# Altium footprint library FMU3_REV_D.PcbLib: 37 footprints (part 1 of 3)
Each footprint in its own frame and in the unit in brackets; x right, y up, seen from the top. Pads: shape width x height; smd on the part's side, far side on the other; paste and mask are expansions set on the pad; w line width, h text height; cw(c..) or ccw(c..) is an arc to the next point about the centre after c.
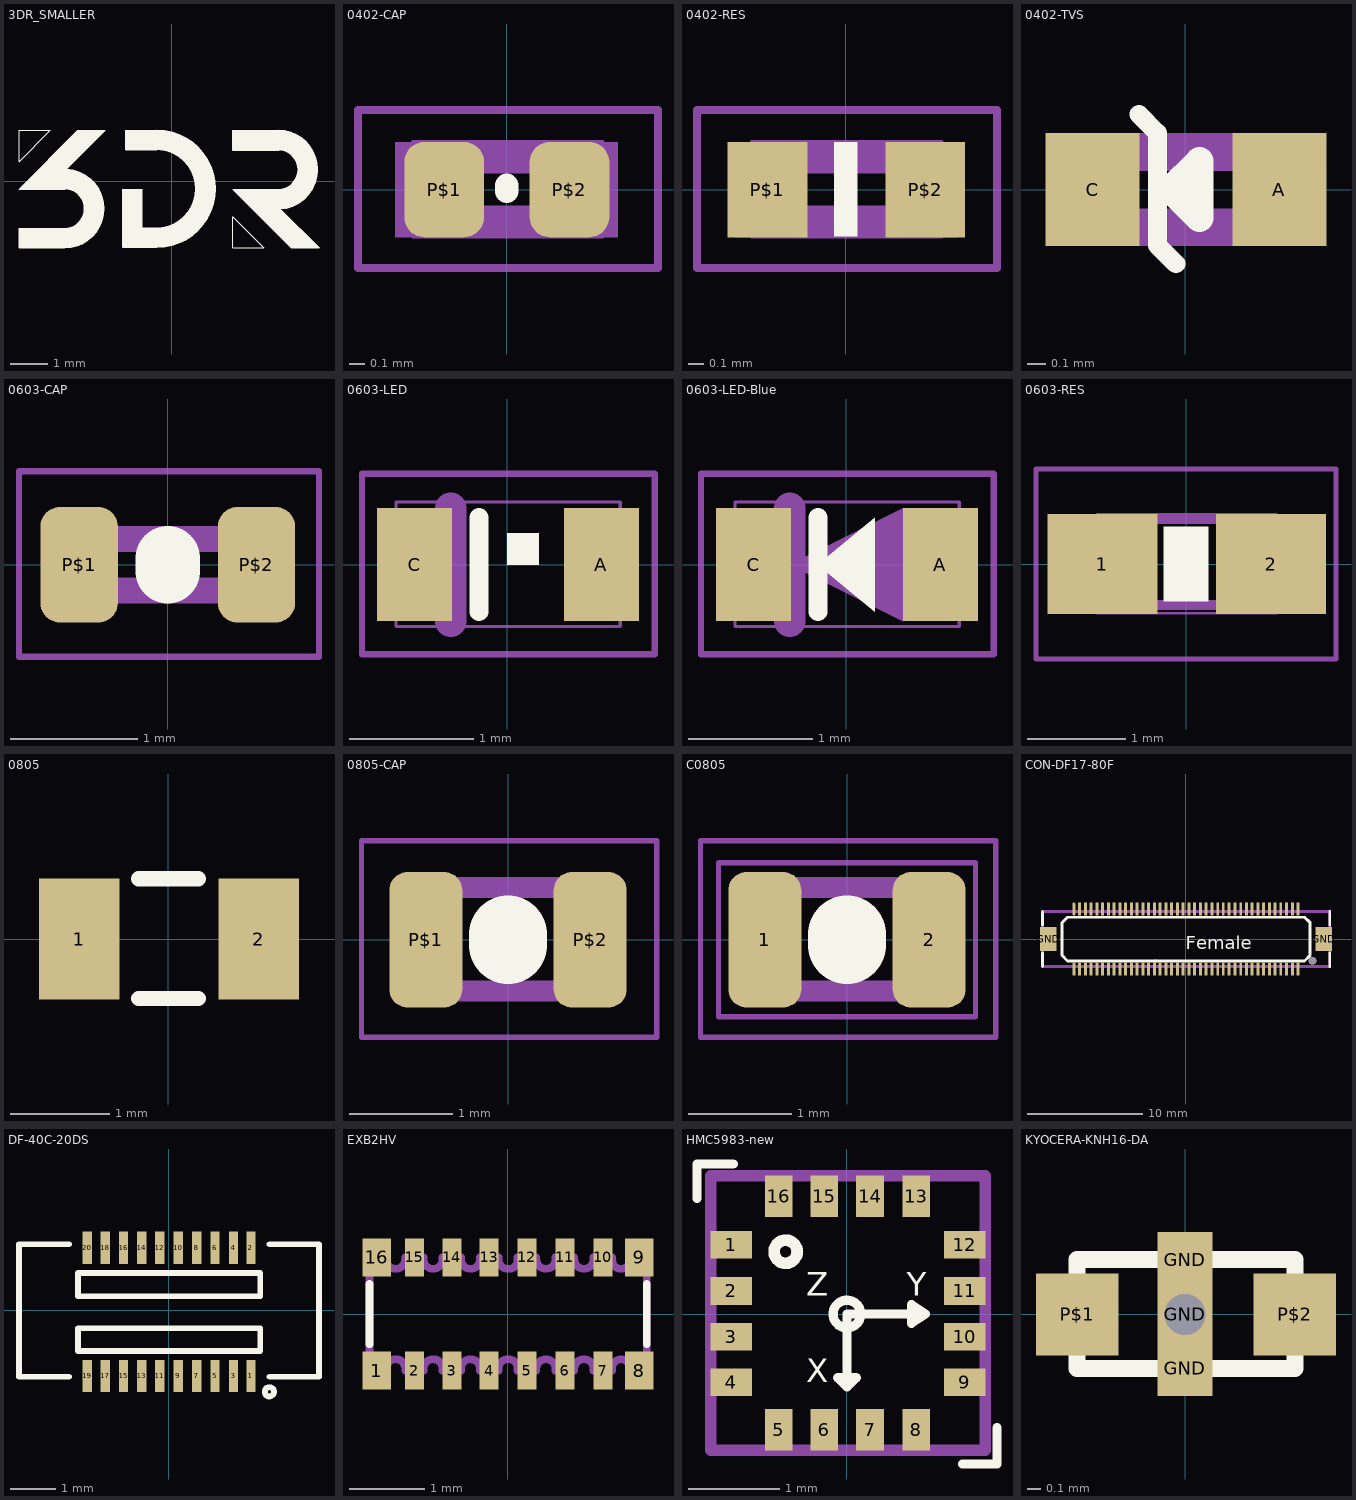
[diagram p0: the footprints below, top view; thin cyan lines are the x and y axes]

## 3DR_SMALLER [mil]
Top Overlay:
  drawing of 45 lines, arcs and shapes, not listed
Top Solder:
  region: 96.53,-69.74 63.94,-69.74 63.94,-37.15
  region: -160.22,20.8 -160.22,53.38 -127.63,53.38

## 0402-CAP [mil]
pads (2):
  rrect50% 20x24 smd mask+0: P$1(-15.75,0) P$2(15.75,0)
Top Overlay:
  lines w6: 0,-0.39 0,1
Mechanical 16:
  rectangle: -28.04,-12 -16.04,12
  rectangle: 15.96,-12 27.96,12
  lines w1: -23.62,-11.81 24,-11.81 24,12 -23.62,12 -23.62,-11.81
  lines w2: -37.4,-19.68 38,-19.68 38,20 -37.4,20 -37.4,-19.68
  lines w8: -20,-8 20,-8 ; -20,8 20,8
3D body: height 19.68, standoff 0, extent -19.69,-9.84 19.69,9.84

## 0402-RES [mil] "0402-RES"
height 66.93
pads (2):
  rect 20x24 smd: P$1(-19.68,0) P$2(20,0)
Top Overlay:
  rectangle: -3,-11.8 3,12.01
Mechanical 16:
  rectangle: -28,-12 -16,12
  rectangle: 16,-12 28,12
  lines w1: -23.62,-11.81 24,-11.81 24,12 -23.62,12 -23.62,-11.81
  lines w2: -37.4,-19.68 38,-19.68 38,20 -37.4,20 -37.4,-19.68
  lines w8: -20,-8 20,-8 ; -20,8 20,8
3D body: height 19.68, standoff 0, extent -19.69,-9.84 19.69,9.84

## 0402-TVS [mil] "0402-TVS"
pads (2):
  rect 20x24 smd: A(20,0) C(-19.68,0)
Top Overlay:
  lines w4: -9.84,16 -5.91,12 -5.91,-11.81 -1.97,-15.75
  lines w6: -3,0 3,6 3,0 ; -3,0 3,-6 3,0 ; -3,0 3,0
Mechanical 16:
  rectangle: -28,-12 -16,12
  rectangle: 16,-12 28,12
  lines w8: -20,-8 20,-8 ; -20,8 20,8
3D body: height 19.68, standoff 0, extent -19.69,-9.84 19.68,9.84

## 0603-CAP [mil] "0603-CAP"
pads (2):
  rrect50% 24x36 smd mask+0: P$1(-27.56,0) P$2(27.56,0)
Top Overlay:
  lines w20: 0,-2 0,2
Mechanical 16:
  rectangle: -28,-12 -16,12
  rectangle: 16,-12 28,12
  lines w2: -46.26,-28.54 47,-28.54 47,29 -46.26,29 -46.26,-28.54
  lines w8: -20,-8 20,-8 ; -20,8 20,8
3D body: height 34.25, standoff -0.39, extent -31.5,-15.95 31.5,15.94

## 0603-LED [mil]
pads (2):
  rect 24x36 smd: A(30,0) C(-29.53,0)
Top Overlay:
  region: 0,0 10,0 10,10 0,10
  lines w6: -9,-15 -9,15
Mechanical 16:
  region: 0,0 10,0 10,10 0,10
  lines w1: -35.43,-19.68 36,-19.68 36,20 -35.43,20 -35.43,-19.68
  lines w2: -46.26,-28.54 47,-28.54 47,29 -46.26,29 -46.26,-28.54
  lines w10: -18,-18 -18,18

## 0603-LED-Blue [mil] "0603-LED_Blue"
pads (2):
  rect 24x36 smd: A(30,0) C(-29.53,0)
Top Overlay:
  region: -9,0 9,15 9,-15
  lines w6: -9,-15 -9,15
Mechanical 16:
  region: -18,0 18,18 18,-18
  lines w1: -35.43,-19.68 -35.43,20 36,20 36,-19.68 -35.43,-19.68
  lines w2: -46.26,-28.54 -46.26,29 47,29 47,-28.54 -46.26,-28.54
  lines w10: -18,-18 -18,18
3D body: height 35.43, standoff 0, extent -33.46,-17.72 33.47,17.72

## 0603-RES [mil] "0603-RES"
pads (2):
  rect 44x40 smd: 1(-33.46,0) 2(34,0)
Top Overlay:
  rectangle: -9,-15 9,15
Mechanical 6:
  rectangle: -7.87,-11.81 8,12
Mechanical 16:
  rectangle: -33,-18.5 -13.31,19
  rectangle: 13,-18.5 33,19
  lines w1: -35.43,-19.68 36,-19.68 36,20 -35.43,20 -35.43,-19.68
  lines w2: -60,-38 60,-38 60,38 -60,38 -60,-38
  lines w4: -14.02,-16.5 15,-16.5 ; -14.02,18 15,18
3D body: height 34.25, standoff -0.39, extent -31.5,-15.94 31.5,15.95

## 0805 [mil] "0805"
pads (2):
  rect 32x48 smd: 1(-35.43,0) 2(36,0)
Top Overlay:
  lines w6: -11.81,-23.62 12,-23.62 ; -11.81,24 12,24
3D body: height 30.79, standoff 0, extent -39.37,-24.61 39.37,24.6

## 0805-CAP [mil]
pads (2):
  rrect50% 28x52 smd mask+0: P$1(-31.5,0) P$2(31.5,0)
Top Overlay:
  lines w30: 0,-2 0,2
Mechanical 16:
  rectangle: 24,-23.67 40,24
  rectangle: -39.37,-23.67 -23.62,24
  lines w2: -56.1,-37.4 -56.1,38 57,38 57,-37.4 -56.1,-37.4
  lines w8: -23.62,-19.68 24,-19.68 ; -23.62,20 24,20
3D body: height 30.79, standoff 0, extent -39.37,-24.6 39.37,24.6

## C0805 [mil]
height 66.93
pads (2):
  rrect50% 28x52 smd mask+0: 1(-31.5,0) 2(31.5,0)
Top Overlay:
  lines w30: 0,-2 0,2
Mechanical 2:
  lines w1.97: -49.21,-29.53 -49.21,29.53 49.21,29.53 49.21,-29.53 -49.21,-29.53
Mechanical 3:
Mechanical 16:
  rectangle: 23.99,-23.67 39.99,24
  rectangle: -39.37,-23.67 -23.62,24
  lines w2: -56.1,-37.4 -56.1,38 57,38 57,-37.4 -56.1,-37.4
  lines w8: -23.62,-19.68 24,-19.68 ; -23.62,20 24,20
3D body: height 30.79, standoff 0, extent -39.37,-24.61 39.37,24.61

## CON-DF17-80F [mil]
pads (83):
  rrect100% 10x44 smd: 1(-383.86,103)
  rect 10x44 smd: 2(-383.86,-102.36) 3(-364.17,103) 4(-364.17,-102.36) 5(-344.49,103) 6(-344.49,-102.36) 7(-324.8,103) 8(-324.8,-102.36) 9(-305.12,103) 10(-305.12,-102.36) 11(-285.43,103) 12(-285.43,-102.36) 13(-265.75,103) 14(-265.75,-102.36) 15(-246.06,103) 16(-246.06,-102.36) 17(-226.38,103) 18(-226.38,-102.36) 19(-206.69,103) 20(-206.69,-102.36) 21(-187.01,103) 22(-187.01,-102.36) 23(-167.32,103) 24(-167.32,-102.36) 25(-147.64,103) 26(-147.64,-102.36) 27(-127.95,103) 28(-127.95,-102.36) 29(-108.27,103) 30(-108.27,-102.36) 31(-88.58,103) 32(-88.58,-102.36) 33(-68.9,103) 34(-68.9,-102.36) 35(-49.21,103) 36(-49.21,-102.36) 37(-29.53,103) 38(-29.53,-102.36) 39(-9.84,103) 40(-9.84,-102.36) 41(10,103) 42(10,-102.36) 43(30,103) 44(30,-102.36) 45(50,103) 46(50,-102.36) 47(69,103) 48(69,-102.36) 49(89,103) 50(89,-102.36) 51(109,103) 52(109,-102.36) 53(128,103) 54(128,-102.36) 55(148,103) 56(148,-102.36) 57(168,103) 58(168,-102.36) 59(188,103) 60(188,-102.36) 61(207,103) 62(207,-102.36) 63(227,103) 64(227,-102.36) 65(247,103) 66(247,-102.36) 67(266,103) 68(266,-102.36) 69(286,103) 70(286,-102.36) 71(306,103) 72(306,-102.36) 73(325,103) 74(325,-102.36) 75(345,103) 76(345,-102.36) 77(365,103) 78(365,-102.36) 79(384,103) 80(384,-102.36)
  rect 56x83 smd: GND(-472.44,0) GND(473,0)
  round 25.98 hole 26 unplated: hole-2(434,-74.8)
Top Overlay:
  lines w10: -492.13,-94.49 -492.13,-47.24 ; -492.13,48 -492.13,95 ; 493,-94.49 493,-47.24 ; 493,48 493,95 ; -425.2,-55.12 -405.51,-74.8 406,-74.8 426,-55.12 426,56 406,75 -405.51,75 -425.2,56 -425.2,-55.12
  text "Female" at 0,-50 h77.5
Mechanical 16:
  lines w10: -106.3,-74.8 -102.36,-74.8 ; -492.13,-94.49 -492.13,95 493,95 493,-94.49 -492.13,-94.49
3D body: height 118.11, standoff -23.62, extent -491.85,-112.2 492.4,112.21

## DF-40C-20DS [mil] "DF-40C-20DS"
pads (20):
  rect 8x28 smd: 1(71,-57.09) 2(71,54) 3(56,-57.09) 4(56,54) 5(40,-57.09) 6(40,54) 7(24,-57.09) 8(24,54) 9(8,-57.09) 10(8,54) 11(-7.87,-57.09) 12(-7.87,54) 13(-23.62,-57.09) 14(-23.62,54) 15(-39.37,-57.09) 16(-39.37,54) 17(-55.12,-57.09) 18(-55.12,54) 19(-70.87,-57.09) 20(-70.87,54)
Top Overlay:
  circle w5: c87,-70.87 r4
  lines w5: -86.61,-57.87 -129.92,-57.87 -129.92,57 -86.61,57 ; 87,-57.87 130,-57.87 130,57 87,57 ; -78.74,-35.43 -78.74,-15.75 79,-15.75 79,-35.43 -78.74,-35.43 ; -78.74,12 79,12 79,32 -78.74,32 -78.74,12
3D body: height 55.12, standoff -1.97, extent -129.92,-68.07 129.92,65

## EXB2HV [mil] "EXB2HV"
pads (16):
  rect 15x20 smd: 1(-68.9,-29.53) 8(69,-29.53) 9(69,30) 16(-68.9,30)
  rect 10x20 smd: 2(-49.21,-29.53) 3(-29.53,-29.53) 4(-9.84,-29.53) 5(10,-29.53) 6(30,-29.53) 7(50,-29.53) 10(50,30) 11(30,30) 12(10,30) 13(-9.84,30) 14(-29.53,30) 15(-49.21,30)
Top Overlay:
  lines w4: -72.83,-15.75 -72.83,16 ; 73,-15.75 73,16
Mechanical 16:
  lines w4: -72.83,-29.53 -72.83,30 -63.98,30 -63.98,29 ccw(c-59.11,28.86) -59.25,24 -58.86,24 ccw(c-59,28.86) -54.13,29 -54.13,30 -44.29,30 -44.29,29 ccw(c-39.43,28.86) -39.57,24 -39.17,24 ccw(c-39.31,28.86) -34.45,29 -34.45,30 -24.61,30 -24.61,29 ccw(c-19.74,28.86) -19.88,24 -19.49,24 ccw(c-19.63,28.86) -14.76,29 -14.76,30 -4.92,30 -4.92,29 ccw(c-0.06,28.86) -0.2,24 1,24 ccw(c0.5,28.5) 5,29 5,30 15,30 15,29 ccw(c20,29) 20,24 ccw(c20,29) 25,29 25,30 35,30 35,29 ccw(c40,29) 40,24 ccw(c40,29) 45,29 45,30 55,30 55,29 ccw(c59.5,28.5) 59,24 60,24 ccw(c59.5,28.5) 64,29 64,30 73,30 73,-29.53 64,-29.53 64,-28.35 ccw(c59.64,-27.98) 60,-23.62 59,-23.62 ccw(c59.36,-27.98) 55,-28.35 55,-29.53 45,-29.53 45,-28.35 ccw(c40.14,-28.48) 40,-23.62 ccw(c39.86,-28.48) 35,-28.35 35,-29.53 25,-29.53 25,-28.35 ccw(c20.14,-28.48) 20,-23.62 ccw(c19.86,-28.48) 15,-28.35 15,-29.53 5,-29.53 5,-28.35 ccw(c0.64,-27.98) 1,-23.62 -0.2,-23.62 ccw(c-0.2,-28.35) -4.92,-28.35 -4.92,-29.53 -14.76,-29.53 -14.76,-28.35 ccw(c-19.49,-28.35) -19.49,-23.62 -19.88,-23.62 ccw(c-19.88,-28.35) -24.61,-28.35 -24.61,-29.53 -34.45,-29.53 -34.45,-28.35 ccw(c-39.17,-28.35) -39.17,-23.62 -39.57,-23.62 ccw(c-39.57,-28.35) -44.29,-28.35 -44.29,-29.53 -54.13,-29.53 -54.13,-28.35 ccw(c-58.86,-28.35) -58.86,-23.62 -59.25,-23.62 ccw(c-59.25,-28.35) -63.98,-28.35 -63.98,-29.53 -72.83,-29.53
3D body: height 19.84, standoff -0.16, extent -60.1,-20 -40,20
3D body: height 19.84, standoff -0.16, extent 59.95,-20 80.05,20
3D body: height 19.84, standoff -0.16, extent 39.9,-20 60,20
3D body: height 19.84, standoff -0.16, extent 19.9,-20 40,20
3D body: height 19.84, standoff -0.16, extent -0.1,-20 20,20
3D body: height 19.84, standoff -0.16, extent -20.1,-20 0,20
3D body: height 19.84, standoff -0.16, extent -40.1,-20 -20,20
3D body: height 19.84, standoff -0.16, extent -80.1,-20 -60,20

## HMC5983-new [mil] "HMC5983"
pads (16):
  rect 18x12 smd: 1(-50.2,30) 2(-50.2,10) 3(-50.2,-9.84) 4(-50.2,-29.53) 9(51,-29.53) 10(51,-9.84) 11(51,10) 12(51,30)
  rect 12x18 smd: 5(-29.53,-50.2) 6(-9.84,-50.2) 7(10,-50.2) 8(30,-50.2) 13(30,51) 14(10,51) 15(-9.84,51) 16(-29.53,51)
Top Overlay:
  circle w4: c0,0 r6
  circle w5: c-26.57,27 r5
  lines w4: -64.96,50 -64.96,65 -49.21,65 ; 50,-64.96 65,-64.96 65,-49.21 ; 0,-31.5 -3.94,-27.56 4,-27.56 0,-31.5 ; 0,-31.5 0,0 34,0 ; 34,0 28,-3.94 28,4 34,0
  text "Z" at -17.72,8 h10.2
  text "Y" at 26,8 h10.2
  text "X" at -17.72,-29.53 h10.2
Mechanical 16:
  lines w5: -59.06,-59.06 -59.06,60 ; -59.06,-59.06 60,-59.06 ; -59.06,-59.06 -59.06,60 ; -59.06,-59.06 60,-59.06 ; -59.06,60 60,60 ; -59.06,60 60,60 ; 60,-59.06 60,60 ; 60,-59.06 60,60
3D body: height 35.43, standoff 0, extent -59,-58.88 60.77,60.88

## KYOCERA-KNH16-DA [mil] "KYOCERA-KNH16-DA"
pads (5):
  rect 16x16 smd: GND(0,-15.75) GND(0,16)
  rect 16x16 hole 12: GND(0,0)
  rect 24x24 smd: P$1(-31.5,0) P$2(32,0)
Top Overlay:
  lines w5: -31.5,-15.75 -31.5,16 32,16 32,-15.75 -31.5,-15.75
3D body: height 13.78, standoff 0, extent -19.69,-9.84 19.69,9.84